# Altium schematic symbol library ETA6003Q3Q.SchLib: 1 symbol
Pins are listed as number, name and electrical type; pins without a type are passive.

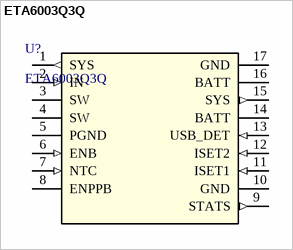
[diagram p0: symbol ETA6003Q3Q]

## ETA6003Q3Q
designator U?
Description; Manufacturer_Name: E-T-A; Copyright: Copyright (C) 2025 Ultra Librarian. All rights reserved.; Manufacturer_Part_Number: ETA6003Q3Q; RefDes: RefDes; Type: Type
footprint QFN3x3-16_EUS
pins: 1 SYS (out), 2 IN (in), 3 SW, 4 SW, 5 PGND (power), 6 ENB (in), 7 NTC (in), 8 ENPPB, 9 STATS (out), 10 GND (power), 11 ISET1 (in), 12 ISET2 (in), 13 USB_DET (in), 14 BATT (power), 15 SYS (out), 16 BATT (power), 17 GND (power)